# Altium schematic symbol library Other.SchLib: 1 symbol
Pins are listed as number, name and electrical type; pins without a type are passive.

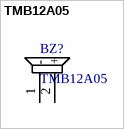
[diagram p0: symbol TMB12A05]

## TMB12A05
designator BZ?
Active Buzzer 5V, THT 12mm; Manufacturer: Huaneng; note: *; Manufacturer Part Number: TMB12A05; ComponentLink1Description: LCSC; ComponentLink1URL: https://www.lcsc.com/product-detail/C96093.html
footprint TMB12A05 (Buzzer 12mm, 2 pads, THT, 7.6mm pin spacing)
pins: 1 - "_", 2 + "_"